# Altium footprint library ACB_PcbLib.PcbLib: 40 footprints (part 1 of 3)
Each footprint in its own frame and in the unit in brackets; x right, y up, seen from the top. Pads: shape width x height; smd on the part's side, far side on the other; paste and mask are expansions set on the pad; w line width, h text height; cw(c..) or ccw(c..) is an arc to the next point about the centre after c.
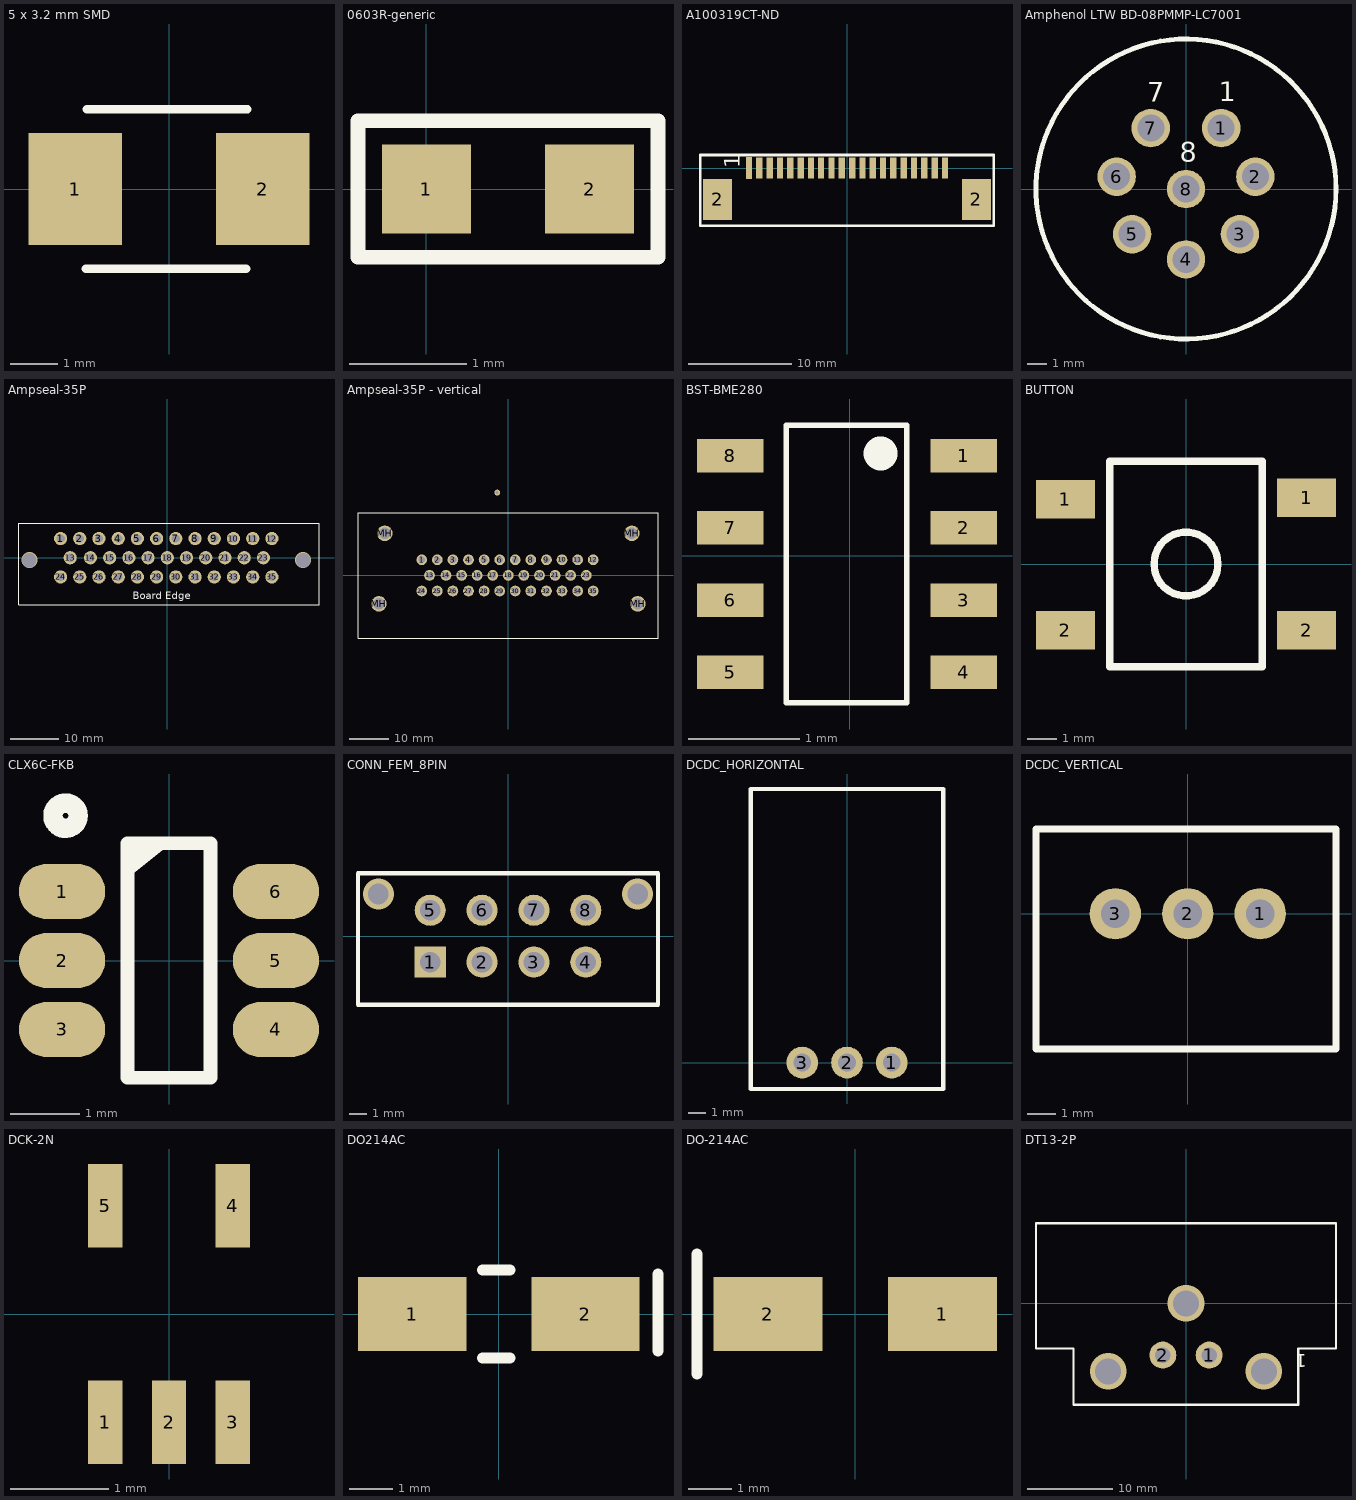
[diagram p0: the footprints below, top view; thin cyan lines are the x and y axes]

## 5 x 3.2 mm SMD [mm]
pads (2):
  rect 2x2.4 smd: 1(-2,0) 2(2,0)
Top Overlay:
  lines w0.178: -1.779,-1.7 1.65,-1.7 ; -1.754,1.7 1.675,1.7
3D body: height 1.2, standoff 0, extent -2.5,-1.6 2.5,1.6

## 0603R-generic [mil] "RESISTOR 0603"
pads (2):
  rect 30x30 smd: 1(0,0) 2(55,0)
Top Overlay:
  lines w5: -23,-23 78,-23 78,23 -23,23 -23,-23
3D body: height 16, standoff 15, extent 9.5,-10.5 14.5,-0.5
3D body: height 16, standoff 15, extent 17,-10.5 22,-0.5
3D body: height 16, standoff 15, extent 24.5,-10.5 29.5,-0.5
3D body: height 16, standoff 15, extent 43.5,0.5 48.5,10.5
3D body: height 16, standoff 15, extent 36,0.5 41,10.5
3D body: height 16, standoff 15, extent 13.5,0.5 18.5,10.5
3D body: height 19, standoff 0, extent -4,-15 5,15
3D body: height 19, standoff 0, extent 50,-15 59,15
3D body: height 19, standoff 18, extent 5,-13 50,13
3D body: height 18, standoff 0, extent -3,-14 58,14
3D body: height 16, standoff 15, extent 6,0.5 11,10.5
3D body: height 16, standoff 15, extent 21,0.5 26,10.5
3D body: height 16, standoff 15, extent 28.5,0.5 33.5,10.5
3D body: height 16, standoff 15, extent 32,-10.5 37,-0.5
3D body: height 16, standoff 15, extent 39.5,-10.5 44.5,-0.5

## A100319CT-ND [mil]
pads (22):
  rect 24x82.68 smd: 1(-374.02,0)
  rect 110.24x157.48 smd: 2(-494.09,-120.08) 2(494.09,-120.08)
  rect 24x80 smd: 2(-334.65,0) 3(-295.28,0) 4(-255.91,0) 5(-216.54,0) 6(-177.17,0) 7(-137.8,0) 8(-99.6,0) 9(-59.06,0) 10(-19.68,0) 11(20.4,0) 12(59.06,0) 13(98.43,0) 14(137.8,0) 15(177.17,0) 16(216.54,0) 17(255.91,0) 18(295.28,0) 19(334.65,0) 20(374.02,0)
Top Overlay:
  lines w10: -560,-220 -560,50 560,50 560,-220 -560,-220
  text "1" at -410,0 h60
3D body "A100319CT-ND.stp": height 100.2, standoff -0.59, extent -549.61,-225.55 549.61,31.93

## Amphenol LTW BD-08PMMP-LC7001 [mm]
pads (8):
  round 2 hole 1.4: 1(1.83,3.17) 2(3.605,0.64) 3(2.805,-2.35) 4(0,-3.66) 5(-2.805,-2.35) 6(-3.605,0.64) 7(-1.83,3.17) 8(0,0)
Top Overlay:
  circle w0.254: c0,0 r7.8
  text "1" at 1.7,4.575 h1.02
  text "7" at -2.025,4.525 h1.02
  text "8" at -0.325,1.425 h1.02
3D body: height 2.2, standoff 0, extent -7,-7 7,7
3D body: height 4, standoff 2.2, extent -10.15,-10.147 10.15,10.147
3D body: height 18, standoff 4, extent -7.25,-7.247 7.25,7.247

## Ampseal-35P [mm]
pads (35):
  round 2.75 hole 1.75: 1(-22.225,4) 2(-18.225,4) 3(-14.225,4) 4(-10.225,4) 5(-6.225,4) 6(-2.225,4) 7(1.775,4) 8(5.775,4) 9(9.775,4) 10(13.775,4) 11(17.775,4) 12(21.775,4) 13(-20.225,0) 14(-16,0) 15(-12,0) 16(-8,0) 17(-4,0) 18(0,0) 19(4,0) 20(8,0) 21(12,0) 22(16,0) 23(20,0) 24(-22.225,-4) 25(-18.225,-4) 26(-14.225,-4) 27(-10.225,-4) 28(-6.225,-4) 29(-2.225,-4) 30(1.775,-4) 31(5.775,-4) 32(9.775,-4) 33(13.775,-4) 34(17.775,-4) 35(21.775,-4)
via -28.725,-0.5 diameter 3.3 hole 3
via 28.275,-0.5 diameter 3.3 hole 3
Top Overlay:
  lines w0.254: -30.875,-9.8 -30.875,7.2 31.575,7.2 31.575,-9.8 -30.875,-9.8
  text "Board Edge" at -7.175,-8.6 h1.52
3D body "c-776163-1-r-3d.stp": height 27.85, standoff -4.25, extent -38.7,-31.675 38.2,6.125

## Ampseal-35P - vertical [mm]
pads (40):
  round 2.75 hole 1.75: 1(-22.225,4) 2(-18.225,4) 3(-14.225,4) 4(-10.225,4) 5(-6.225,4) 6(-2.225,4) 7(1.775,4) 8(5.775,4) 9(9.775,4) 10(13.775,4) 11(17.775,4) 12(21.775,4) 13(-20.225,0) 14(-16,0) 15(-12,0) 16(-8,0) 17(-4,0) 18(0,0) 19(4,0) 20(8,0) 21(12,0) 22(16,0) 23(20,0) 24(-22.225,-4) 25(-18.225,-4) 26(-14.225,-4) 27(-10.225,-4) 28(-6.225,-4) 29(-2.225,-4) 30(1.775,-4) 31(5.775,-4) 32(9.775,-4) 33(13.775,-4) 34(17.775,-4) 35(21.775,-4)
  round 1.524 hole 0.762: 6(-2.85,21.25)
  round 4 hole 3: MH(-33.2,-7.3) MH(-31.7,10.8) MH(31.7,10.8) MH(33.2,-7.3)
Top Overlay:
  lines w0.254: -38.575,-16.15 -38.575,16.075 38.4,16.075 38.4,-16.15 -38.575,-16.15
  text "." at -38.225,17.05 h1.52
3D body "c-1-776231-2-d-3d.stp": height 34, standoff -4.05, extent -38.625,-16.025 38.275,16.075

## BST-BME280 [mm] "Environmental sensor."
pads (8):
  rect 0.6x0.3 smd: 1(1.025,0.9) 2(1.025,0.25) 3(1.025,-0.4) 4(1.025,-1.05) 5(-1.075,-1.05) 6(-1.075,-0.4) 7(-1.075,0.25) 8(-1.075,0.9)
Top Overlay:
  circle w0.254: c0.277,0.92 r0.025
  lines w0.05: -0.57,-1.325 0.514,-1.325 0.514,1.175 -0.57,1.175 -0.57,-1.325

## BUTTON [mm]
pads (4):
  rect 2x1.3 smd: 1(-4.1,2.2) 1(4.1,2.25) 2(-4.1,-2.25) 2(4.1,-2.25)
Top Overlay:
  circle w0.254: c0,0 r1.085
  lines w0.254: -2.6,-3.5 2.6,-3.5 2.6,3.5 -2.6,3.5 -2.6,-3.5

## CLX6C-FKB [mm]
pads (6):
  oval 1.25x0.8 smd: 1(-1.55,1) 2(-1.55,0) 3(-1.55,-1) 4(1.55,-1) 5(1.55,0) 6(1.55,1)
Top Overlay:
  circle w0.2: c-1.5,2.1 r0.224
  circle w0.2: c-1.5,2.1 r0.141
  region: -0.6,1.7 -0.1,1.6 -0.6,1.2
  lines w0.2: -0.6,-1.7 0.6,-1.7 0.6,1.7 -0.6,1.7 -0.6,-1.7
3D body: height 2.8, standoff 0, extent -1.7,-1.7 1.7,1.7

## CONN_FEM_8PIN [mm]
pads (8):
  rect 1.8x1.8 hole 1.2: 1(-4.5,-1.5)
  round 1.8 hole 1.2: 2(-1.5,-1.5) 3(1.5,-1.5) 4(4.5,-1.5) 5(-4.5,1.5) 6(-1.5,1.5) 7(1.5,1.5) 8(4.5,1.5)
via 7.5,2.44 diameter 1.8 hole 1.2
via -7.5,2.44 diameter 1.8 hole 1.2
Top Overlay:
  lines w0.254: -8.675,-3.975 -8.675,3.65 8.675,3.65 8.675,-3.975 -8.675,-3.975
  text "." at -4.625,-4.775 h1.52
3D body "430450812.stp": height 9.95, standoff -3.14, extent -8.1,-3.945 8.05,4.825

## DCDC_HORIZONTAL [mm]
pads (3):
  round 1.8 hole 1: 1(2.54,0) 2(0,0) 3(-2.54,0)
Top Overlay:
  lines w0.254: -5.45,-1.5 -5.45,15.5 5.45,15.5 5.45,-1.5 -5.45,-1.5
3D body "mps_dcdc_oki_78sr_horiz_a.step": height 7.75, standoff -5.18, extent -5.232,-1.285 5.182,15.225

## DCDC_VERTICAL [mm]
pads (3):
  round 1.8 hole 1: 1(2.54,0) 2(0,0) 3(-2.54,0)
Top Overlay:
  lines w0.254: -5.325,-4.75 -5.325,2.975 5.2,2.975 5.2,-4.75 -5.325,-4.75
3D body "mps_dcdc_oki_78sr_a.step": height 17.18, standoff -2.63, extent -5.275,-4.867 5.139,2.867

## DCK-2N [mm] "2 input nand"
pads (5):
  rect 0.35x0.85 smd: 1(-0.65,-1.1) 2(0,-1.1) 3(0.65,-1.1) 4(0.65,1.1) 5(-0.65,1.1)
3D body: height 1.1, standoff 0, extent -1.075,-0.7 1.075,0.7
3D body: height 0.25, standoff 0, extent -3.125,0.675 -2.85,0.95

## DO214AC [mm]
pads (2):
  rect 2.5x1.7 smd: 1(-2,0) 2(2,0)
Top Overlay:
  lines w0.254: -0.381,-1.016 0.254,-1.016 ; -0.381,1.016 0.254,1.016 ; 3.675,-0.853 3.675,0.925
3D body: height 2.5, standoff 0, extent -2.421,-1.1 2.4,1.1

## DO-214AC [mm]
pads (2):
  rect 2.5x1.7 smd: 1(2,0) 2(-2,0)
Top Overlay:
  lines w0.254: -3.625,-1.375 -3.625,1.375
3D body: height 2.5, standoff 0, extent -2.375,-1.45 2.375,1.45

## DT13-2P [mil]
pads (2):
  round 125 hole 72: 1(107.5,-240) 2(-107.5,-240)
via 0,0 diameter 170 hole 120
via -360.5,-315 diameter 170 hole 120
via 360.5,-315 diameter 170 hole 120
Top Overlay:
  lines w10: -521,-470 520,-470 520,-210 695,-210 695,371 ; -521,-465 -521,-210 -695,-210 -695,371 690,371
  text "1" at 560,-235 h60
3D body "DT13-2P.stp": height 1090, standoff -121, extent -695,-475 695,945